# Altium schematic symbol library VEML6030.SchLib: 1 symbol
Pins are listed as number, name and electrical type; pins without a type are passive.

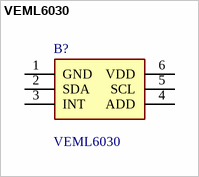
[diagram p0: symbol VEML6030]

## VEML6030
designator B?
VEML6030 Vishay, Ambient Light Sensor, Ambient Light to Digital Data I2C 6-Pin; Geometry.Height: 0.87mm; Mouser Part Number: 78-VEML6030; Mouser Price/Stock: https://www.mouser.co.uk/ProductDetail/Vishay-Semiconductors/VEML6030?qs=oeTp6q%252Bm7GMZCCnCKRrv4g%3D%3D; Manufacturer_Name: Vishay; Manufacturer_Part_Number: VEML6030; Datasheet Link: https://www.vishay.com/docs/84366/veml6030.pdf
footprint VEML6030
pins: 1 GND, 2 SDA, 3 INT, 4 ADD, 5 SCL, 6 VDD